# Altium schematic symbol library Diodes.SchLib: 5 symbols
Pins are listed as number, name and electrical type; pins without a type are passive.

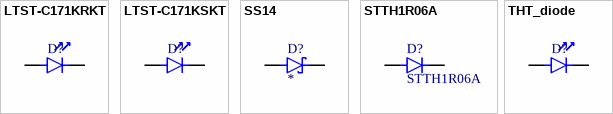
[diagram p0: symbols LTST-C171KRKT to THT_diode]

## LTST-C171KRKT
designator D?
LED; red; SMD; 0805; 18÷54mcd; 2÷2.4VDC; 2x1.25x0.8mm; 130°; 20mA
footprint LTST-C171K (LED ;SMD; 0805 2x1.25x0.8)
pins: 1 A, 2 K

## LTST-C171KSKT
designator D?
LED; yellow; SMD; 0805; 18÷180mcd; 1.6÷2.4VDC; 2x1.25x0.8mm; 130°
footprint LTST-C171K (LED ;SMD; 0805 2x1.25x0.8)
pins: 1 A, 2 K

## SS14
designator D?
1A, 40V, Schottky Rectifier; MF: Taiwan Semiconductor; MP: SS14; SnapEDA_Link: https://www.snapeda.com/parts/SS14/taiwan/view-part/?ref=snap; Package: SMA-2 Taiwan Semiconductor; Check_prices: https://www.snapeda.com/parts/SS14/taiwan/view-part/?ref=eda
footprint DIOM5226X230N
pins: 1 A, 2 K

## STTH1R06A
designator D?
Diode: rectifying; SMD; 600V; 1A; 25ns; SMA; Ufmax: 1V; Ifsm: 20A
footprint STTH1R06A (Diode: rectifying; SMD; 600V; 1A; 25ns; SMA; Ufmax: 1V; Ifsm: 20A)
pins: 1 A, 2 K

## THT_diode
designator D?
tht diode
footprint THT_diode (tht diode 3mm pitch 5,5mm diameter)
pins: 1 A, 2 K